# Altium footprint library 1-1734248-5.PcbLib: 1 footprints
Each footprint in its own frame and in the unit in brackets; x right, y up, seen from the top. Pads: shape width x height; smd on the part's side, far side on the other; paste and mask are expansions set on the pad; w line width, h text height; cw(c..) or ccw(c..) is an arc to the next point about the centre after c.
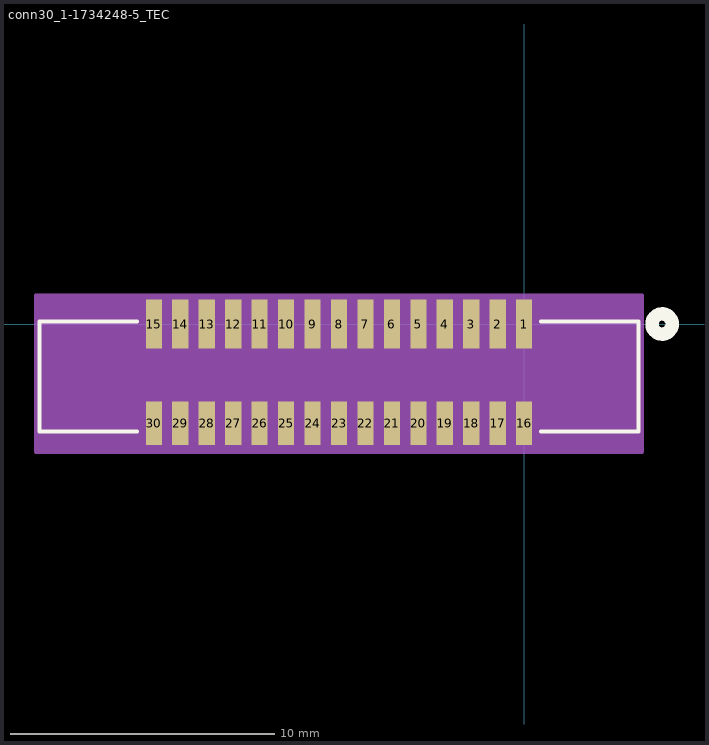
[diagram p0: the footprint, top view; thin cyan lines are the x and y axes]

## conn30_1-1734248-5_TEC [mil]
pads (30):
  rect 24x73 smd paste+0 mask+0: 1(0,0) 2(-39.37,0) 3(-78.74,0) 4(-118.11,0) 5(-157.48,0) 6(-196.85,0) 7(-236.22,0) 8(-275.59,0) 9(-314.96,0) 10(-354.33,0) 11(-393.7,0) 12(-433.07,0) 13(-472.44,0) 14(-511.81,0) 15(-551.18,0)
  rect 24x65 smd paste+0 mask+0: 16(0,-147.64) 17(-39.37,-147.64) 18(-78.74,-147.64) 19(-118.11,-147.64) 20(-157.48,-147.64) 21(-196.85,-147.64) 22(-236.22,-147.64) 23(-275.59,-147.64) 24(-314.96,-147.64) 25(-354.33,-147.64) 26(-393.7,-147.64) 27(-433.07,-147.64) 28(-472.44,-147.64) 29(-511.81,-147.64) 30(-551.18,-147.64)
Top Overlay:
  circle w20: c205.35,0 r15
  lines w6: -576.28,-159.97 -721.54,-159.97 -721.54,4.03 -576.28,4.03 ; 25.1,-159.97 170.35,-159.97 170.35,4.03 25.1,4.03
Bottom Overlay:
  circle w20: c205.35,0 r15
Mechanical 13:
  circle w20: c0,0 r15
  lines w1: -716.54,-154.97 -716.54,-0.97 165.35,-0.97 165.35,-154.97 -716.54,-154.97
Mechanical 15:
  region: 175,41.32 -726.89,41.32 -726.89,-191.32 175,-191.32
  lines w6: -726.54,-190.14 175.35,-190.14 175.35,42.5 -726.54,42.5 -726.54,-190.14
3D body "c-1-1734248-5-e-3d.stp": height 222.46, standoff -1.17, extent -715,-170.94 166.89,20